# Altium footprint library Connector Power.PcbLib: 83 footprints (part 1 of 6)
Each footprint in its own frame and in the unit in brackets; x right, y up, seen from the top. Pads: shape width x height; smd on the part's side, far side on the other; paste and mask are expansions set on the pad; w line width, h text height; cw(c..) or ccw(c..) is an arc to the next point about the centre after c.
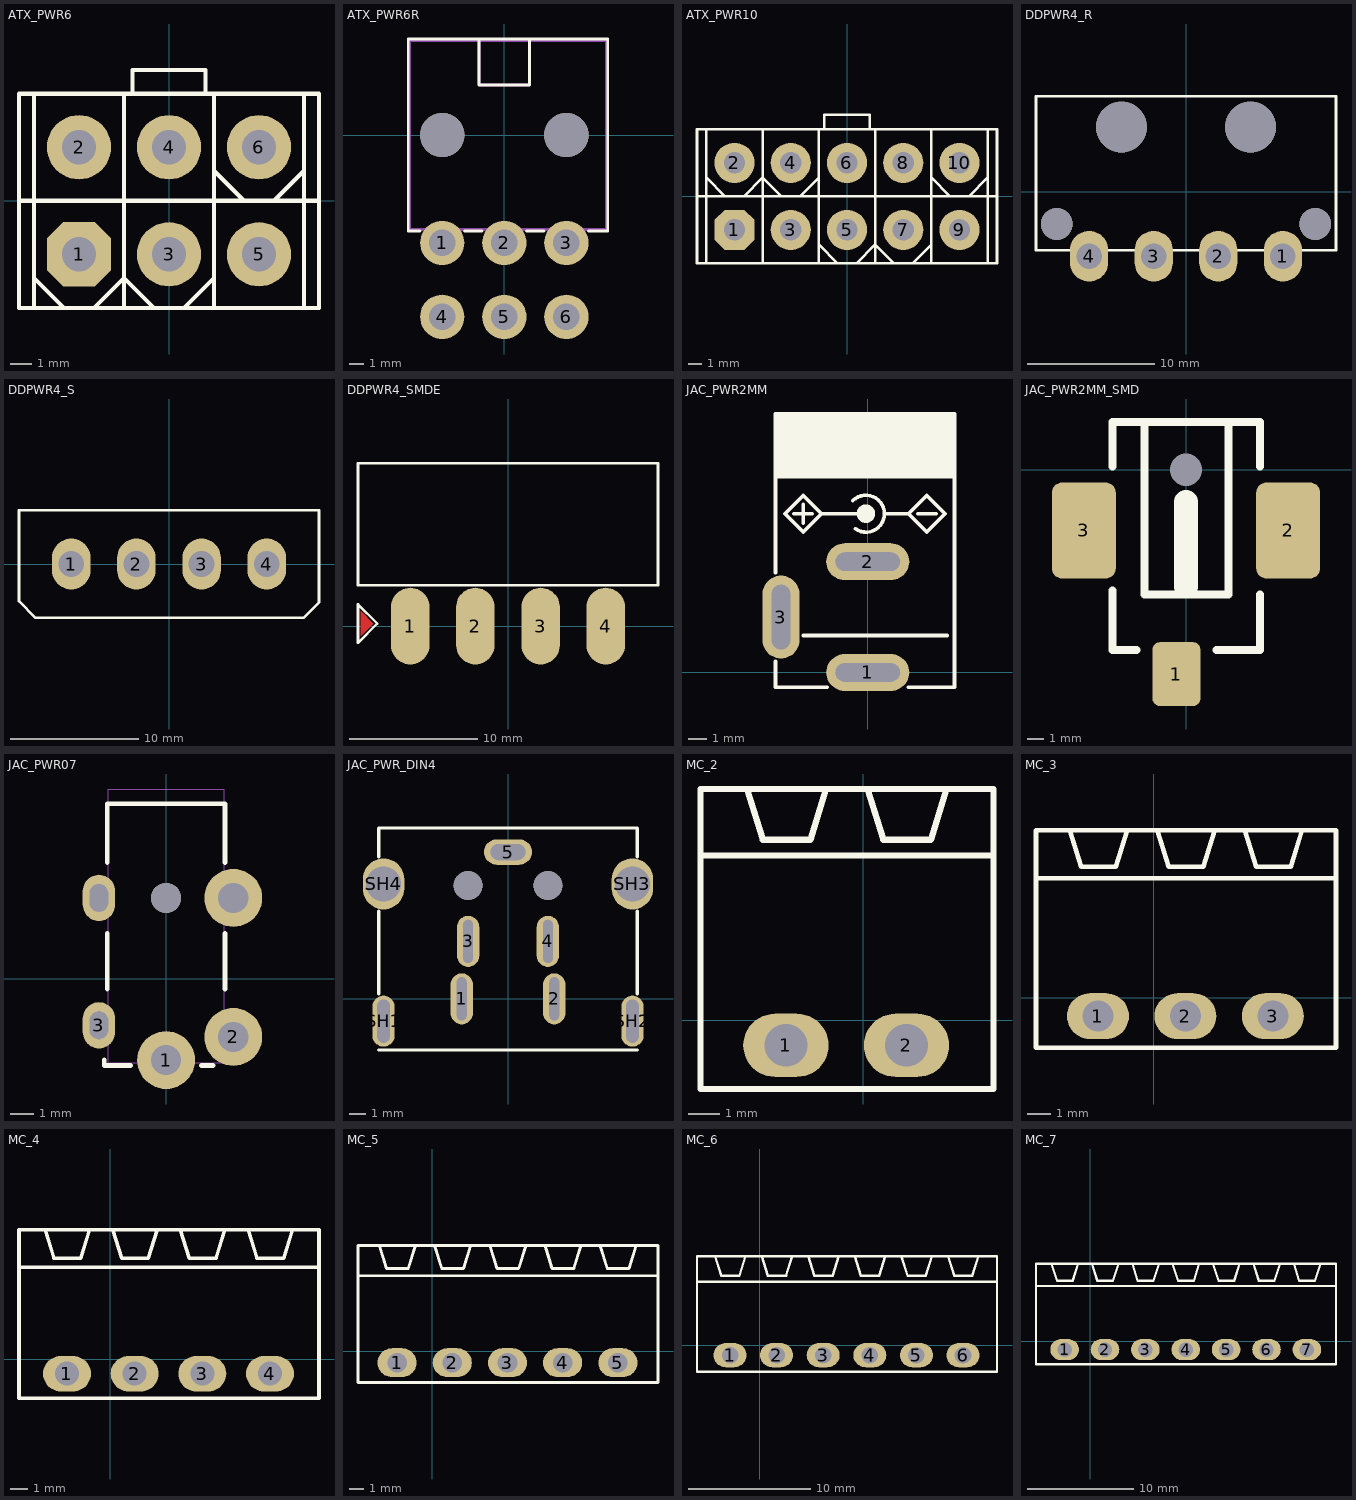
[diagram p0: the footprints below, top view; thin cyan lines are the x and y axes]

## ATX_PWR6 [mm] "Connector; ATX Power; 6 Position, TE 4-1775099-1"
pads (6):
  oct 3x3 hole 1.6: 1(-4.2,-2.5)
  round 3 hole 1.6: 2(-4.2,2.5) 3(0,-2.5) 4(0,2.5) 5(4.2,-2.5) 6(4.2,2.5)
Top Overlay:
  lines w0.2: -7,0 7,0 ; -6.3,-5 -6.3,5 ; -6.3,-3.6 -4.9,-5 ; -3.5,-5 -2.1,-3.6 -0.7,-5 ; -2.1,-5 -2.1,5 ; -1.7,5 -1.7,6.1 1.7,6.1 1.7,5 ; 0.7,-5 2.1,-3.6 ; 2.1,-5 2.1,5 ; 2.1,1.4 3.5,0 ; 4.9,0 6.3,1.4 ; 6.3,-5 6.3,5 ; -7,-5 7,-5 7,5 -7,5 -7,-5
3D body "4-1775099-1.stp": height 13, standoff -3, extent -6.85,-4.8 6.85,6.1

## ATX_PWR6R [mm] "PCI Express POWER CONNECTOR 6PIN 12V Right Angle"
height 9.6
pads (8):
  round 3 hole 1.8 mask+0.1: 1(-4.2,-7.3) 2(0,-7.3) 3(4.2,-7.3) 4(-4.2,-12.3) 5(0,-12.3) 6(4.2,-12.3)
  round 3 hole 3 mask+0.1: ""(-4.2,0) ""(4.2,0)
Top Overlay:
  lines w0.2: -5.7,-6.5 -6.5,-6.5 -6.5,6.5 7,6.5 7,-6.5 5.7,-6.5 ; -2.7,-6.5 -1.5,-6.5 ; -1.7,6.5 -1.7,3.4 1.7,3.4 1.7,6.5 ; 1.5,-6.5 2.7,-6.5
Mechanical 13:
  lines w0.2: -1.7,6.4 -1.7,3.4 1.7,3.4 1.7,6.4 ; -6.4,-6.4 -6.4,6.4 6.9,6.4 6.9,-6.4 -6.4,-6.4
3D body "c-5794173-4-a-3d.stp": height 12.65, standoff -3.95, extent -11.9,-13.3 11.9,6.634

## ATX_PWR10 [mm] "Connector; ATX Power; 10 Position, TE 4-1775099-3"
pads (10):
  oct 3x3 hole 1.6: 1(-8.4,-2.5)
  round 3 hole 1.6: 2(-8.4,2.5) 3(-4.2,-2.5) 4(-4.2,2.5) 5(0,-2.5) 6(0,2.5) 7(4.2,-2.5) 8(4.2,2.5) 9(8.4,-2.5) 10(8.4,2.5)
Top Overlay:
  lines w0.2: -11.2,0 11.2,0 ; -10.5,-5 -10.5,5 ; -10.5,1.4 -9.1,0 ; -7.7,0 -6.3,1.4 -4.9,0 ; -6.3,-5 -6.3,5 ; -3.5,0 -2.1,1.4 ; -2.1,-5 -2.1,5 ; -2.1,-3.6 -0.7,-5 ; -1.7,5 -1.7,6.1 1.7,6.1 1.7,5 ; 0.7,-5 2.1,-3.6 3.5,-5 ; 2.1,-5 2.1,5 ; 4.9,-5 6.3,-3.6 ; 6.3,-5 6.3,5 ; 6.3,1.4 7.7,0 ; 9.1,0 10.5,1.4 ; 10.5,-5 10.5,5 ; -11.2,-5 11.2,-5 11.2,5 -11.2,5 -11.2,-5
3D body "4-1775099-3.stp": height 13, standoff -3, extent -11.053,-4.805 11.047,6.095

## DDPWR4_R [mm] "DP04PR IDE DISK DRIVE 4pin power connector Right Angle Power Plug"
height 8.45
pads (8):
  oval 3x4 hole 2: 1(7.62,-5.08) 2(2.54,-5.08) 3(-2.54,-5.08) 4(-7.62,-5.08)
  round 2.5 hole 2.5 unplated: ""(-10.16,-2.54) ""(10.16,-2.54)
  round 4 hole 4 unplated: ""(-5.08,5.08) ""(5.08,5.08)
Top Overlay:
  lines w0.2: -9,-4.6 -11.8,-4.6 -11.8,7.5 11.8,7.5 11.8,-4.6 9,-4.6 ; -6.2,-4.6 -3.92,-4.6 ; -1.2,-4.6 1.16,-4.6 ; 3.9,-4.6 6.24,-4.6
3D body "Header 5.08mm disk drive power SRA.stp": height 8.44, standoff -3.88, extent -11.633,-5.742 11.633,7.949

## DDPWR4_S [mm] "DP04PR IDE DISK DRIVE 4pin power connector Straight Power Plug"
height 8.45
pads (4):
  oval 3x4 hole 2: 1(-7.62,0) 2(-2.54,0) 3(2.54,0) 4(7.62,0)
Top Overlay:
  lines w0.2: -11.7,-2.9 -10.4,-4.2 10.5,-4.2 11.7,-3 11.7,4.2 -11.7,4.2 -11.7,-2.9
3D body "Header 5.08mm disk drive power ST.stp": height 10.16, standoff -3.6, extent -11.63,-4.14 11.63,4.14

## DDPWR4_SMDE [mm] "DP04PR IDE DISK DRIVE 4pin power connector Straight Power Plug"
height 8.45
pads (4):
  oval 3x6 smd: 1(-7.62,0) 2(-2.54,0) 3(2.54,0) 4(7.62,0)
Top Layer:
  region: -11.5,-0.8 -10.5,0.2 -11.5,1.2
Top Overlay:
  lines w0.2: -11.7,-1.3 -11.7,1.7 -10.2,0.2 -11.7,-1.3 ; -11.7,3.2 11.7,3.2 11.7,12.7 -11.7,12.7 -11.7,3.2
3D body "Header 5.08mm disk drive power ST.stp": height 5.04, standoff -3.24, extent -11.63,-1.2 11.63,12.56

## JAC_PWR2MM [mm] "Power Jack KLDX-0202"
pads (3):
  oval 4.5x2 hole 1 slot 3.5 at 0 deg: 1(0,0) 2(0,6)
  oval 2x4.5 hole 1 slot 3.5 at 90 deg: 3(-4.7,3)
Top Overlay:
  circle w0.4: c-0.1,8.6 r0.3
  rectangle: -5,10.5 4.7,14
  lines w0.2: -5,0.6 -5,-0.8 -2.2,-0.8 ; -5,5.4 -5,14 4.7,14 4.7,-0.8 2.2,-0.8 ; -4,8.6 -3,8.6 ; -3.5,2 4.3,2 ; -3.5,8.1 -3.5,9.1 ; -0.807,9.307 cw(c-0.1,8.6) -0.674,7.781 ; -0.1,8.6 -2.5,8.6 ; 0.9,8.6 2.2,8.6 ; 2.7,8.6 3.7,8.6 ; -2.5,8.6 -3.49,9.59 -4.48,8.6 -3.49,7.61 -2.5,8.6 ; 2.2,8.6 3.19,7.61 4.18,8.6 3.19,9.59 2.2,8.6
3D body "KLDX-0202-A_rD2.STEP": height 10.8, standoff -4.1, extent -4.9,-0.65 4.5,13.85

## JAC_PWR2MM_SMD [mm] "CUI PJ-036A-SMT"
pads (4):
  rrect30% 3x4 smd: 1(-0.6,-12.8)
  rrect30% 4x6 smd: 2(6.4,-3.8) 3(-6.4,-3.8)
  rrect30% 0x0 hole 2.032 unplated: 4(0,0)
Top Overlay:
  lines w0.5: -4.6,-7.55 -4.6,-11.3 -3.1,-11.3 ; -4.6,0.2 -4.6,3 4.65,3 4.65,0.2 ; -2.6,3 -2.6,-7.8 2.65,-7.8 2.65,2.9 ; 1.9,-11.3 4.65,-11.3 4.65,-7.8
  lines w1.5: 0,-7.3 0,-2
3D body "CUI-PJ-036A-SMT.step": height 11.09, standoff -1.51, extent -7.5,-14.1 7.7,3

## JAC_PWR07 [mm] "Power Connector, 0.7mm ID, 2.35mm OD"
height 5
pads (6):
  round 2.5 hole 1.3: 1(0,-3.5) 2(2.9,-2.5) ""(2.9,3.5)
  oval 1.4x2 hole 0.8 slot 1.2 at 90 deg: 3(-2.9,-2) ""(-2.9,3.5)
  round 1.3 hole 1.3 unplated: ""(0,3.5)
Top Overlay:
  lines w0.2: -2.667,-3.484 -2.667,-3.738 -1.524,-3.738 ; -2.54,-0.436 -2.54,1.977 ; -2.54,5.025 -2.54,7.565 2.54,7.565 2.54,5.025 ; 1.524,-3.738 2.032,-3.738 ; 2.54,-0.436 2.54,1.977
Mechanical 13:
  lines w0.05: -2.819,-2.506 -2.819,-1.515 ; -2.819,3.006 -2.819,3.996 ; -2.502,-2.506 -3.073,-2.506 -3.073,-1.515 -2.502,-1.515 ; -2.502,3.006 -3.073,3.006 -3.073,3.996 -2.502,3.996 ; -0.495,-3.611 -0.495,-3.738 0.495,-3.738 0.495,-3.611 ; 2.502,-2.989 3.073,-2.989 3.073,-1.998 2.502,-1.998 ; 2.502,3.006 3.073,3.006 3.073,3.996 2.502,3.996 ; 2.819,-2.989 2.819,-1.998 ; 2.819,3.006 2.819,3.996 ; -2.502,-3.611 -2.502,8.2 2.502,8.2 2.502,-3.611 -2.502,-3.611
3D body "Conn_Kobiconn_163-4307-E.stp": height 5, standoff -2.5, extent -3.309,-3.854 3.309,8.2

## JAC_PWR_DIN4 [mm] "Power Connector, KPJX-4S-S"
height 5
pads (11):
  oval 1.4x3.2 hole 0.6 slot 2.7 at 90 deg: 1(-2.9,0) 2(2.9,0) 3(-2.5,3.6) 4(2.5,3.6)
  oval 3x1.6 hole 1 slot 2.2 at 0 deg: 5(0,9.2)
  oval 1.4x3.2 hole 0.8 slot 2.7 at 90 deg: SH1(-7.8,-1.4) SH2(7.8,-1.4)
  oval 2.6x3.2 hole 2.2: SH3(7.8,7.2) SH4(-7.8,7.2)
  round 1.8 hole 1.8 unplated: ""(-2.5,7.1) ""(2.5,7.1)
Top Overlay:
  lines w0.2: -8.1,-3.2 8.1,-3.2 ; -8.1,0.3 -8.1,5.5 ; -8.1,8.9 -8.1,10.7 8.1,10.7 8.1,8.9 ; 8.1,0.3 8.1,5.5
3D body "User Library-KPJX-4S-S.step": height 15, standoff -3.5, extent -8,-3.05 8,14.6

## MC_2 [mm] "PHOENIX MC 1.5/2-GF-3.81"
pads (2):
  oval 2.7x2 hole 1.35: 1(-2.44,-0.8) 2(1.37,-0.8)
Top Overlay:
  lines w0.2: -5.08,5.2 4.11,5.2 ; -3.67,7.3 -3.17,5.7 -1.67,5.7 -1.17,7.3 ; 0.14,7.3 0.64,5.7 2.14,5.7 2.64,7.3 ; -5.14,-2.18 -5.14,7.3 4.12,7.3 4.12,-2.18 -5.14,-2.18
3D body "User Library-1803277.STEP": height 7.35, standoff -3.3, extent -5.005,-2.1 4.005,7.2

## MC_3 [mm] "PHOENIX MC 1.5/3-GF-3.81"
pads (3):
  oval 2.7x2 hole 1.35: 1(-2.44,-0.8) 2(1.37,-0.8) 3(5.18,-0.8)
Top Overlay:
  lines w0.2: -5.08,5.2 7.92,5.2 ; -3.67,7.3 -3.17,5.7 -1.67,5.7 -1.17,7.3 ; 0.14,7.3 0.64,5.7 2.14,5.7 2.64,7.3 ; 3.95,7.3 4.45,5.7 5.95,5.7 6.45,7.3 ; -5.14,-2.18 7.93,-2.18 7.93,7.3 -5.14,7.3 -5.14,-2.18
3D body "User Library-1803277.STEP": height 7.35, standoff -3.3, extent -1.195,-2.1 7.815,7.2
3D body "User Library-1803277.STEP": height 7.35, standoff -3.3, extent -5.005,-2.1 4.005,7.2

## MC_4 [mm] "PHOENIX MC 1.5/4-GF-3.81"
pads (4):
  oval 2.7x2 hole 1.35: 1(-2.44,-0.8) 2(1.37,-0.8) 3(5.18,-0.8) 4(8.99,-0.8)
Top Overlay:
  lines w0.2: -5.08,5.2 11.73,5.2 ; -3.67,7.3 -3.17,5.7 -1.67,5.7 -1.17,7.3 ; 0.14,7.3 0.64,5.7 2.14,5.7 2.64,7.3 ; 3.95,7.3 4.45,5.7 5.95,5.7 6.45,7.3 ; 7.76,7.3 8.26,5.7 9.76,5.7 10.26,7.3 ; -5.14,-2.18 -5.14,7.3 11.75,7.3 11.75,-2.18 -5.14,-2.18
3D body "User Library-1803277.STEP": height 7.35, standoff -3.3, extent 2.615,-2.1 11.625,7.2
3D body "User Library-1803277.STEP": height 7.35, standoff -3.3, extent -5.005,-2.1 4.005,7.2
3D body "User Library-1803277.STEP": height 7.35, standoff -3.3, extent -1.195,-2.1 7.815,7.2

## MC_5 [mm] "PHOENIX MC 1.5/5-GF-3.81"
pads (5):
  oval 2.7x2 hole 1.35: 1(-2.44,-0.8) 2(1.37,-0.8) 3(5.18,-0.8) 4(8.99,-0.8) 5(12.8,-0.8)
Top Overlay:
  lines w0.2: -5.08,5.2 15.56,5.2 ; -3.67,7.3 -3.17,5.7 -1.67,5.7 -1.17,7.3 ; 0.14,7.3 0.64,5.7 2.14,5.7 2.64,7.3 ; 3.95,7.3 4.45,5.7 5.95,5.7 6.45,7.3 ; 7.76,7.3 8.26,5.7 9.76,5.7 10.26,7.3 ; 11.57,7.3 12.07,5.7 13.57,5.7 14.07,7.3 ; -5.14,-2.18 15.57,-2.18 15.57,7.3 -5.14,7.3 -5.14,-2.18
3D body "User Library-1803277.STEP": height 7.35, standoff -3.3, extent -1.195,-2.1 7.815,7.2
3D body "User Library-1803277.STEP": height 7.35, standoff -3.3, extent -5.005,-2.1 4.005,7.2
3D body "User Library-1803277.STEP": height 7.35, standoff -3.3, extent 2.615,-2.1 11.625,7.2
3D body "User Library-1803277.STEP": height 7.35, standoff -3.3, extent 6.425,-2.1 15.435,7.2

## MC_6 [mm] "PHOENIX MC 1.5/6-GF-3.81"
pads (6):
  oval 2.7x2 hole 1.35: 1(-2.44,-0.8) 2(1.37,-0.8) 3(5.18,-0.8) 4(8.99,-0.8) 5(12.8,-0.8) 6(16.61,-0.8)
Top Overlay:
  lines w0.2: -5.08,5.2 19.39,5.2 ; -3.67,7.3 -3.17,5.7 -1.67,5.7 -1.17,7.3 ; 0.14,7.3 0.64,5.7 2.14,5.7 2.64,7.3 ; 3.95,7.3 4.45,5.7 5.95,5.7 6.45,7.3 ; 7.76,7.3 8.26,5.7 9.76,5.7 10.26,7.3 ; 11.57,7.3 12.07,5.7 13.57,5.7 14.07,7.3 ; 15.38,7.3 15.88,5.7 17.38,5.7 17.88,7.3 ; -5.14,-2.18 19.39,-2.18 19.39,7.3 -5.14,7.3 -5.14,-2.18
3D body "User Library-1803277.STEP": height 7.35, standoff -3.3, extent 10.235,-2.1 19.245,7.2
3D body "User Library-1803277.STEP": height 7.35, standoff -3.3, extent -1.195,-2.1 7.815,7.2
3D body "User Library-1803277.STEP": height 7.35, standoff -3.3, extent -5.005,-2.1 4.005,7.2
3D body "User Library-1803277.STEP": height 7.35, standoff -3.3, extent 2.615,-2.1 11.625,7.2
3D body "User Library-1803277.STEP": height 7.35, standoff -3.3, extent 6.425,-2.1 15.435,7.2

## MC_7 [mm] "PHOENIX MC 1.5/7-GF-3.81"
pads (7):
  oval 2.7x2 hole 1.35: 1(-2.44,-0.8) 2(1.37,-0.8) 3(5.18,-0.8) 4(8.99,-0.8) 5(12.8,-0.8) 6(16.61,-0.8) 7(20.42,-0.8)
Top Overlay:
  lines w0.2: -5.08,5.2 23.16,5.2 ; -3.67,7.3 -3.17,5.7 -1.67,5.7 -1.17,7.3 ; 0.14,7.3 0.64,5.7 2.14,5.7 2.64,7.3 ; 3.95,7.3 4.45,5.7 5.95,5.7 6.45,7.3 ; 7.76,7.3 8.26,5.7 9.76,5.7 10.26,7.3 ; 11.57,7.3 12.07,5.7 13.57,5.7 14.07,7.3 ; 15.38,7.3 15.88,5.7 17.38,5.7 17.88,7.3 ; 19.19,7.3 19.69,5.7 21.19,5.7 21.69,7.3 ; -5.14,-2.18 -5.14,7.3 23.17,7.3 23.17,-2.18 -5.14,-2.18
3D body "User Library-1803277.STEP": height 7.35, standoff -3.3, extent 14.045,-2.1 23.055,7.2
3D body "User Library-1803277.STEP": height 7.35, standoff -3.3, extent 6.425,-2.1 15.435,7.2
3D body "User Library-1803277.STEP": height 7.35, standoff -3.3, extent 2.615,-2.1 11.625,7.2
3D body "User Library-1803277.STEP": height 7.35, standoff -3.3, extent -5.005,-2.1 4.005,7.2
3D body "User Library-1803277.STEP": height 7.35, standoff -3.3, extent -1.195,-2.1 7.815,7.2
3D body "User Library-1803277.STEP": height 7.35, standoff -3.3, extent 10.235,-2.1 19.245,7.2